# Altium footprint library 1.20-电感.PcbLib: 71 footprints (part 2 of 5)
Each footprint in its own frame and in the unit in brackets; x right, y up, seen from the top. Pads: shape width x height; smd on the part's side, far side on the other; paste and mask are expansions set on the pad; w line width, h text height; cw(c..) or ccw(c..) is an arc to the next point about the centre after c.
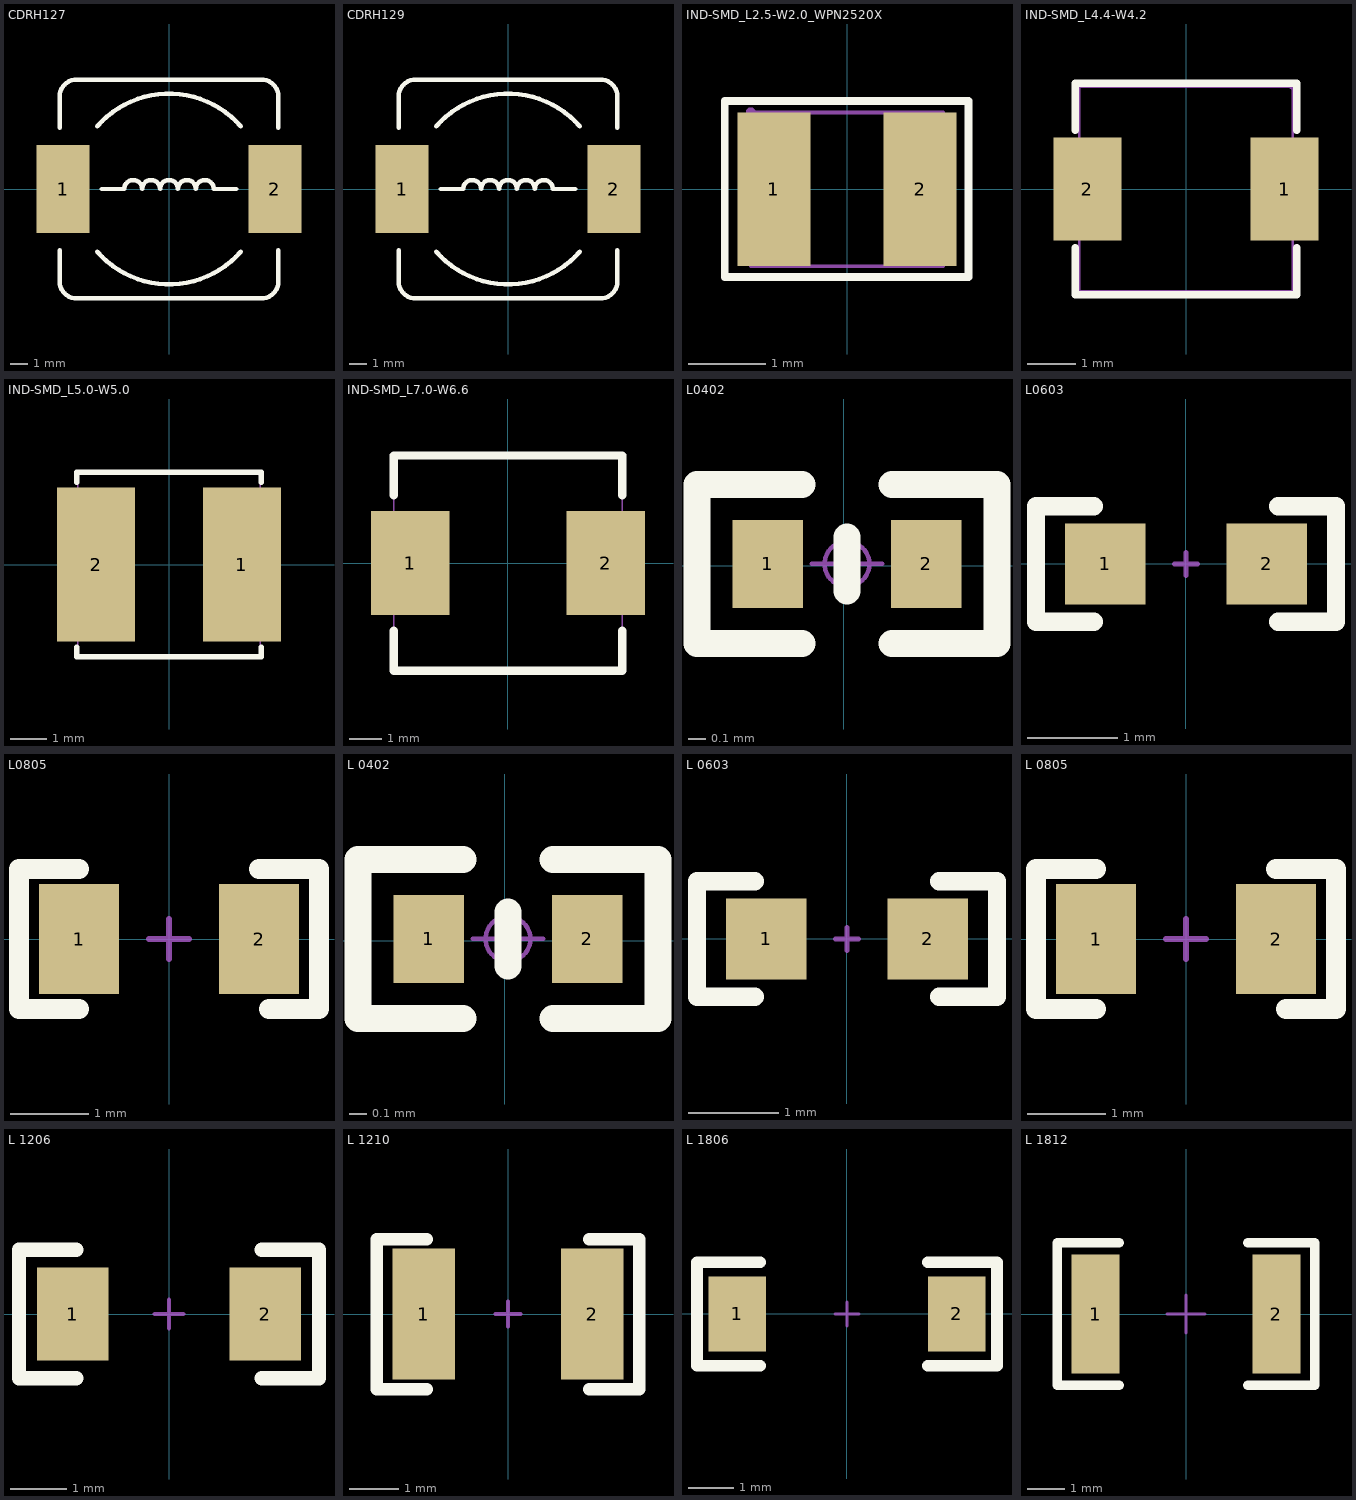
[diagram p1: the footprints below, top view; thin cyan lines are the x and y axes]

## CDRH127 [mm] "12*12*8mm（长宽高）"
pads (2):
  rect 3x5 smd: 1(-6,0) 2(6,0)
Top Overlay:
  lines w0.254: -6.2,-3.475 -6.2,-5.23 ccw(c-5.23,-5.23) -5.23,-6.2 5.23,-6.2 ccw(c5.23,-5.23) 6.2,-5.23 6.2,-3.475 ; -6.2,3.475 -6.2,5.23 cw(c-5.23,5.23) -5.23,6.2 5.23,6.2 cw(c5.23,5.23) 6.2,5.23 6.2,3.475 ; -4.064,-3.556 ccw(c0,0) 4.064,-3.556 ; -4.064,3.556 cw(c0,0) 4.064,3.556 ; -3.81,0 -2.54,0 cw(c-2.032,0) -1.524,0 cw(c-1.016,0) -0.508,0 cw(c0,0) 0.508,0 cw(c1.016,0) 1.524,0 cw(c2.032,0) 2.54,0 3.81,0
3D body "CDRH127.STEP": height 7.8, standoff 0, extent -6,-6 6,6

## CDRH129 [mm] "12*12*9.5mm（长宽高）"
pads (2):
  rect 3x5 smd: 1(-6,0) 2(6,0)
Top Overlay:
  lines w0.254: -6.2,-3.475 -6.2,-5.23 ccw(c-5.23,-5.23) -5.23,-6.2 5.23,-6.2 ccw(c5.23,-5.23) 6.2,-5.23 6.2,-3.475 ; -6.2,3.475 -6.2,5.23 cw(c-5.23,5.23) -5.23,6.2 5.23,6.2 cw(c5.23,5.23) 6.2,5.23 6.2,3.475 ; -4.064,-3.556 ccw(c0,0) 4.064,-3.556 ; -4.064,3.556 cw(c0,0) 4.064,3.556 ; -3.81,0 -2.54,0 cw(c-2.032,0) -1.524,0 cw(c-1.016,0) -0.508,0 cw(c0,0) 0.508,0 cw(c1.016,0) 1.524,0 cw(c2.032,0) 2.54,0 3.81,0
3D body "CDRH129.STEP": height 9.65, standoff 0.05, extent -6,-6 6,6

## IND-SMD_L2.5-W2.0_WPN2520X [mm]
pads (2):
  rect 0.95x2 smd paste+0.051: 1(-0.95,0) 2(0.95,0)
Top Overlay:
  lines w0.1: -1.59,-1.14 -1.59,1.148 1.58,1.148 1.58,-1.14 -1.59,-1.14
Mechanical 7:
  lines w0.051: -1.25,-1 -1.25,1 1.25,1 1.25,-1 -1.25,-1
Mechanical 8:
  region: -1.19,1 -1.19,0.975 -1.225,0.94 -1.275,0.94 -1.31,0.975 -1.31,1 -1.31,1.025 -1.275,1.06 -1.225,1.06 -1.19,1.025 -1.19,1
Mechanical 9:
  region: -1.25,0.825 -0.5,0.825 -0.5,-0.825 -1.25,-0.825
  region: 0.5,0.825 1.25,0.825 1.25,-0.825 0.5,-0.825
3D body "IND-SMD_L2.5-W2.0.STEP": height 1.02, standoff 0, extent -1.26,-1 1.24,1

## IND-SMD_L4.4-W4.2 [mm]
pads (2):
  rect 1.4x2.12 smd: 1(2.028,0) 2(-2.028,0)
Top Overlay:
  lines w0.152: -2.276,-1.212 -2.276,-2.176 2.276,-2.176 2.276,-1.212 ; -2.276,1.212 -2.276,2.176 2.276,2.176 2.276,1.212
Mechanical 15:
  region: 2.26,2.1 2.26,2.075 2.225,2.04 2.175,2.04 2.14,2.075 2.14,2.1 2.14,2.125 2.175,2.16 2.225,2.16 2.26,2.125 2.26,2.1
  region: 1.4,1 2.2,1 2.2,-1 1.4,-1
  region: -2.2,1 -1.4,1 -1.4,-1 -2.2,-1
  lines w0.051: -2.2,-2.1 -2.2,2.1 2.2,2.1 2.2,-2.1 -2.2,-2.1
3D body "IND-SMD_L4.4-W4.2~IND-SMD_L4.2-W4.4-H2.0~ASYP.STEP": height 2.1, standoff 0, extent -2.2,-2.1 2.2,2.1

## IND-SMD_L5.0-W5.0 [mm]
pads (2):
  rect 2.124x4.22 smd: 1(2,0) 2(-2,0)
Top Overlay:
  lines w0.152: -2.526,-2.262 -2.526,-2.526 2.526,-2.526 2.526,-2.262 ; -2.526,2.262 -2.526,2.526 2.526,2.526 2.526,2.262
Mechanical 15:
  region: -2.5,-1.9 -2.5,1.9 -1.3,1.9 -1.3,-1.9
  region: 2.5,-1.9 2.5,1.9 1.3,1.9 1.3,-1.9
  region: 2.56,2.5 2.56,2.475 2.525,2.44 2.475,2.44 2.44,2.475 2.44,2.5 2.44,2.525 2.475,2.56 2.525,2.56 2.56,2.525 2.56,2.5
  lines w0.051: -2.5,-2.5 -2.5,2.5 2.5,2.5 2.5,-2.5 -2.5,-2.5
3D body "IND-SMD_L5.0-W5.0.STEP": height 2.12, standoff 0, extent -2.51,-2.5 2.51,2.5

## IND-SMD_L7.0-W6.6 [mm]
pads (2):
  rect 2.4x3.2 smd paste+0.051 mask+0: 1(-3,0) 2(3,0)
Top Overlay:
  lines w0.254: -3.5,-2.081 -3.5,-3.3 -3.49,-3.3 3.5,-3.3 3.5,-2.081 ; -3.5,2.081 -3.5,3.3 3.48,3.3 3.5,3.28 ; 3.5,2.081 3.5,3.3
Mechanical 5:
  lines w0.051: -3.5,-3.3 3.5,-3.3 3.5,3.3 -3.5,3.3 -3.5,-3.3
Mechanical 6:
  region: -3.56,-3.3 -3.56,-3.275 -3.525,-3.24 -3.475,-3.24 -3.44,-3.275 -3.44,-3.3 -3.44,-3.325 -3.475,-3.36 -3.525,-3.36 -3.56,-3.325 -3.56,-3.3
Mechanical 7:
  region: -1.9,-1.5 -3.5,-1.5 -3.5,1.5 -1.9,1.5
  region: 1.9,1.5 3.5,1.5 3.5,-1.5 1.9,-1.5
3D body "IND-SMD_L7.0-W6.6.STEP": height 3.1, standoff 0, extent -3.499,-3.299 3.499,3.3

## L0402 [mm] "小功率贴片电感        淘宝ID:黄晶宝石"
pads (2):
  rect 0.4x0.5 smd: 1(-0.431,0.009) 2(0.468,0.009)
Top Overlay:
  lines w0.152: -0.235,-0.441 -0.831,-0.441 ; -0.235,0.459 -0.831,0.459 -0.831,-0.441 ; 0.019,-0.143 0.019,0.162 ; 0.273,-0.441 0.868,-0.441 0.868,0.459 0.273,0.459 ; -0.831,-0.441 -0.831,-0.441
Mechanical 15:
  circle w0.025: c0.019,0.009 r0.127
  lines w0.025: -0.181,0.009 0.219,0.009 ; 0.019,-0.191 0.019,0.209
3D body "0402.STEP": height 0.5, standoff 0, extent -0.5,-0.25 0.5,0.25

## L0603 [mil] "小功率贴片电感        淘宝ID:黄晶宝石"
pads (2):
  rect 35x35 smd: 1(-35,0) 2(35,0)
Top Overlay:
  lines w8: -40,-25 -65,-25 -65,25 -40,25 ; 40,-25 65,-25 65,25 40,25
Mechanical 15:
  lines w2: -5,0 5,0 ; 0,-5 0,0 0,5
3D body "0603.STEP": height 31.5, standoff -0.11, extent -31.5,-15.75 31.5,15.75

## L0805 [mil] "小功率贴片电感        淘宝ID:黄晶宝石"
pads (2):
  rect 40x55 smd: 1(-45,0) 2(45,0)
Top Overlay:
  lines w10: -45,-35 -75,-35 -75,35 -45,35 ; 45,35 75,35 75,-35 50,-35
Mechanical 15:
  lines w3: -10,0 10,0 ; 0,-10 0,10
3D body "0805.STEP": height 35.43, standoff -0.11, extent -39.37,-23.62 39.37,23.62

## L 0402 [mm] "小功率贴片电感        淘宝ID:黄晶宝石"
pads (2):
  rect 0.4x0.5 smd: 1(-0.431,0.009) 2(0.468,0.009)
Top Overlay:
  lines w0.152: -0.235,-0.441 -0.831,-0.441 ; -0.235,0.459 -0.831,0.459 -0.831,-0.441 ; 0.019,-0.143 0.019,0.162 ; 0.273,-0.441 0.868,-0.441 0.868,0.459 0.273,0.459 ; -0.831,-0.441 -0.831,-0.441
Mechanical 15:
  circle w0.025: c0.019,0.009 r0.127
  lines w0.025: -0.181,0.009 0.219,0.009 ; 0.019,-0.191 0.019,0.209
3D body "0402.STEP": height 0.5, standoff 0, extent -0.5,-0.25 0.5,0.25

## L 0603 [mil] "小功率贴片电感        淘宝ID:黄晶宝石"
pads (2):
  rect 35x35 smd: 1(-35,0) 2(35,0)
Top Overlay:
  lines w8: -40,-25 -65,-25 -65,25 -40,25 ; 40,-25 65,-25 65,25 40,25
Mechanical 15:
  lines w2: -5,0 5,0 ; 0,-5 0,0 0,5
3D body "0603.STEP": height 31.5, standoff -0.11, extent -31.5,-15.75 31.5,15.75

## L 0805 [mil] "小功率贴片电感        淘宝ID:黄晶宝石"
pads (2):
  rect 40x55 smd: 1(-45,0) 2(45,0)
Top Overlay:
  lines w10: -45,-35 -75,-35 -75,35 -45,35 ; 45,35 75,35 75,-35 50,-35
Mechanical 15:
  lines w3: -10,0 10,0 ; 0,-10 0,10
3D body "0805.STEP": height 35.43, standoff -0.11, extent -39.37,-23.62 39.37,23.62

## L 1206 [mil] "小功率贴片电感        淘宝ID:黄晶宝石"
pads (2):
  rect 50x65 smd: 1(-67.5,0) 2(67.5,0)
Top Overlay:
  lines w10: -65,-45 -105,-45 -105,45 -65,45 ; 65,-45 105,-45 105,45 65,45
Mechanical 15:
  lines w3: -10,0 10,0 ; 0,-10 0,10
3D body "1206.STEP": height 35.43, standoff -0.19, extent -62.99,-31.5 62.99,31.5

## L 1210 [mil] "小功率贴片电感        淘宝ID:黄晶宝石"
pads (2):
  rect 50x105 smd: 1(-67.5,0) 2(67.5,0)
Top Overlay:
  lines w10: -65,-60 -105,-60 -105,60 -65,60 ; 65,-60 105,-60 105,60 65,60
Mechanical 15:
  lines w3: -10,0 10,0 ; 0,-10 0,10
3D body "1210.STEP": height 51.18, standoff -0.19, extent -62.99,-49.21 62.99,49.21

## L 1806 [mil] "小功率贴片电感"
pads (2):
  rect 50x65 smd: 1(-95,0) 2(95,0)
Top Overlay:
  lines w10: -75,-45 -130,-45 -130,45 -75,45 ; 70,-45 130,-45 130,-40 130,-15 130,45 70,45
Mechanical 15:
  lines w3: -10,0 10,0 ; 0,-10 0,10
3D body "1806.STEP": height 62.99, standoff -0.19, extent -88.58,-31.5 88.58,31.5

## L 1812 [mil] "小功率贴片电感"
pads (2):
  rect 50x125 smd: 1(-95,0) 2(95,0)
Top Overlay:
  lines w10: -70,-75 -135,-75 -135,75 -70,75 ; 65,-75 135,-75 135,75 65,75
Mechanical 15:
  lines w3: -20,0 20,0 ; 0,-20 0,20
3D body "1812.STEP": height 59.06, standoff -0.19, extent -88.58,-62.99 88.58,62.99